# Altium footprint library WR-TBL_Pluggable Connector_3.81mm.PcbLib: 201 footprints (part 11 of 13)
Each footprint in its own frame and in the unit in brackets; x right, y up, seen from the top. Pads: shape width x height; smd on the part's side, far side on the other; paste and mask are expansions set on the pad; w line width, h text height; cw(c..) or ccw(c..) is an arc to the next point about the centre after c.
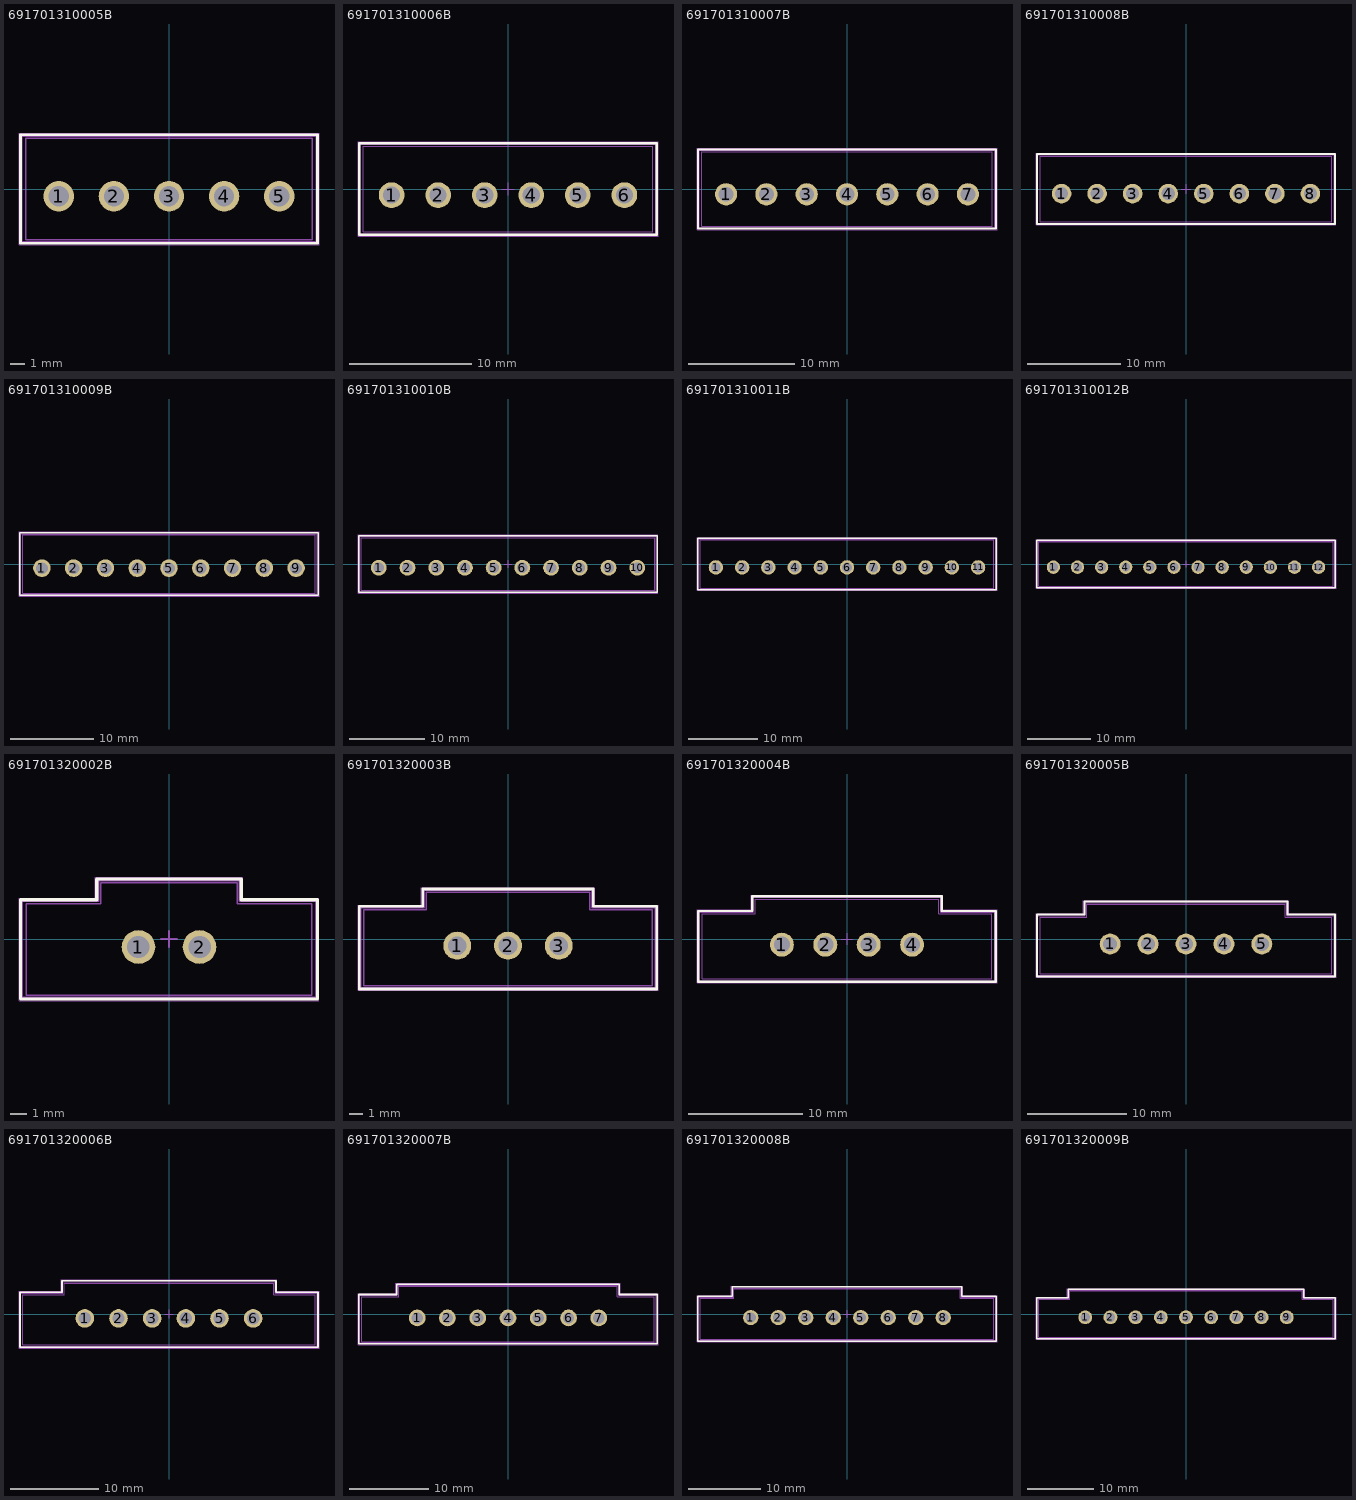
[diagram p10: the footprints below, top view; thin cyan lines are the x and y axes]

## 691701310005B [mm] "Vertical PCB Header THR Type, pitch 3.81mm, 05p"
height 9.2
pads (5):
  round 2.1 hole 1.4: 1(-7.62,-0.5) 2(-3.81,-0.5) 3(0,-0.5) 4(3.81,-0.5) 5(7.62,-0.5)
Top Overlay:
  lines w0.2: -10.27,-3.75 -10.27,3.75 10.27,3.75 10.27,-3.75 -10.27,-3.75
Top Paste:
  region: 2.26,1.75 5.36,1.75 5.36,-2.75 2.26,-2.75
  region: -1.55,1.75 1.55,1.75 1.55,-2.75 -1.55,-2.75
  region: -9.17,1.75 -6.07,1.75 -6.07,-2.75 -9.17,-2.75
  region: -5.36,1.75 -2.26,1.75 -2.26,-2.75 -5.36,-2.75
  region: 6.07,1.75 9.17,1.75 9.17,-2.75 6.07,-2.75
Assembly Notes:
  text "Stencil thickness : 120 μm" at -5.156,-4.701 h1
Top Assembly:
  lines w0.1: -10.17,-3.65 -10.17,3.65 10.17,3.65 10.17,-3.65 -10.17,-3.65
Top Designator:
  text ".Designator" at -3.647,-0.357 h1
Top 3D Body:
  lines w0.1: -9.92,-3.5 -9.92,3.5 9.92,3.5 9.92,-3.5 -9.92,-3.5
Top Courtyard:
  lines w0.05: -10.37,-3.85 -10.37,3.85 10.37,3.85 10.37,-3.85 -10.37,-3.85
Top Component Center:
  lines w0.1: -0.5,0 0.5,0 ; 0,-0.5 0,0.5
3D body "691701310005B.stp": height 9.25, standoff -2.55, extent -10.12,-3.5 10.12,3.5

## 691701310006B [mm] "Vertical PCB Header THR Type, pitch 3.81mm, 06p"
height 9.2
pads (6):
  round 2.1 hole 1.4: 1(-9.525,-0.5) 2(-5.715,-0.5) 3(-1.905,-0.5) 4(1.905,-0.5) 5(5.715,-0.5) 6(9.525,-0.5)
Top Overlay:
  lines w0.2: -12.175,-3.75 -12.175,3.75 12.175,3.75 12.175,-3.75 -12.175,-3.75
Top Paste:
  region: 0.355,1.75 3.455,1.75 3.455,-2.75 0.355,-2.75
  region: -3.455,1.75 -0.355,1.75 -0.355,-2.75 -3.455,-2.75
  region: -11.075,1.75 -7.975,1.75 -7.975,-2.75 -11.075,-2.75
  region: -7.265,1.75 -4.165,1.75 -4.165,-2.75 -7.265,-2.75
  region: 4.165,1.75 7.265,1.75 7.265,-2.75 4.165,-2.75
  region: 7.975,1.75 11.075,1.75 11.075,-2.75 7.975,-2.75
Assembly Notes:
  text "Stencil thickness : 120 μm" at -5.156,-4.701 h1
Top Assembly:
  lines w0.1: -12.075,-3.65 -12.075,3.65 12.075,3.65 12.075,-3.65 -12.075,-3.65
Top Designator:
  text ".Designator" at -3.647,-0.357 h1
Top 3D Body:
  lines w0.1: -11.825,-3.5 -11.825,3.5 11.825,3.5 11.825,-3.5 -11.825,-3.5
Top Courtyard:
  lines w0.05: -12.275,-3.85 -12.275,3.85 12.275,3.85 12.275,-3.85 -12.275,-3.85
Top Component Center:
  lines w0.1: -0.5,0 0.5,0 ; 0,-0.5 0,0.5
3D body "691701310006B.stp": height 9.25, standoff -2.55, extent -12.025,-3.5 12.025,3.5

## 691701310007B [mm] "Vertical PCB Header THR Type, pitch 3.81mm, 07p"
height 9.2
pads (7):
  round 2.1 hole 1.4: 1(-11.43,-0.5) 2(-7.62,-0.5) 3(-3.81,-0.5) 4(0,-0.5) 5(3.81,-0.5) 6(7.62,-0.5) 7(11.43,-0.5)
Top Overlay:
  lines w0.2: -14.08,-3.75 -14.08,3.75 14.08,3.75 14.08,-3.75 -14.08,-3.75
Top Paste:
  region: -1.55,1.75 1.55,1.75 1.55,-2.75 -1.55,-2.75
  region: -5.36,1.75 -2.26,1.75 -2.26,-2.75 -5.36,-2.75
  region: -12.98,1.75 -9.88,1.75 -9.88,-2.75 -12.98,-2.75
  region: -9.17,1.75 -6.07,1.75 -6.07,-2.75 -9.17,-2.75
  region: 2.26,1.75 5.36,1.75 5.36,-2.75 2.26,-2.75
  region: 6.07,1.75 9.17,1.75 9.17,-2.75 6.07,-2.75
  region: 9.88,1.75 12.98,1.75 12.98,-2.75 9.88,-2.75
Assembly Notes:
  text "Stencil thickness : 120 μm" at -5.156,-4.701 h1
Top Assembly:
  lines w0.1: -13.98,-3.65 -13.98,3.65 13.98,3.65 13.98,-3.65 -13.98,-3.65
Top Designator:
  text ".Designator" at -3.647,-0.357 h1
Top 3D Body:
  lines w0.1: -13.73,-3.5 -13.73,3.5 13.73,3.5 13.73,-3.5 -13.73,-3.5
Top Courtyard:
  lines w0.05: -14.18,-3.85 -14.18,3.85 14.18,3.85 14.18,-3.85 -14.18,-3.85
Top Component Center:
  lines w0.1: -0.5,0 0.5,0 ; 0,-0.5 0,0.5
3D body "691701310007B.stp": height 9.25, standoff -2.55, extent -13.93,-3.5 13.93,3.5

## 691701310008B [mm] "Vertical PCB Header THR Type, pitch 3.81mm, 08p"
height 9.2
pads (8):
  round 2.1 hole 1.4: 1(-13.335,-0.5) 2(-9.525,-0.5) 3(-5.715,-0.5) 4(-1.905,-0.5) 5(1.905,-0.5) 6(5.715,-0.5) 7(9.525,-0.5) 8(13.335,-0.5)
Top Overlay:
  lines w0.2: -15.985,-3.75 -15.985,3.75 15.985,3.75 15.985,-3.75 -15.985,-3.75
Top Paste:
  region: -3.455,1.75 -0.355,1.75 -0.355,-2.75 -3.455,-2.75
  region: -7.265,1.75 -4.165,1.75 -4.165,-2.75 -7.265,-2.75
  region: -14.885,1.75 -11.785,1.75 -11.785,-2.75 -14.885,-2.75
  region: -11.075,1.75 -7.975,1.75 -7.975,-2.75 -11.075,-2.75
  region: 0.355,1.75 3.455,1.75 3.455,-2.75 0.355,-2.75
  region: 4.165,1.75 7.265,1.75 7.265,-2.75 4.165,-2.75
  region: 7.975,1.75 11.075,1.75 11.075,-2.75 7.975,-2.75
  region: 11.785,1.75 14.885,1.75 14.885,-2.75 11.785,-2.75
Assembly Notes:
  text "Stencil thickness : 120 μm" at -5.156,-4.701 h1
Top Assembly:
  lines w0.1: -15.885,-3.65 -15.885,3.65 15.885,3.65 15.885,-3.65 -15.885,-3.65
Top Designator:
  text ".Designator" at -3.647,-0.357 h1
Top 3D Body:
  lines w0.1: -15.635,-3.5 -15.635,3.5 15.635,3.5 15.635,-3.5 -15.635,-3.5
Top Courtyard:
  lines w0.05: -16.085,-3.85 -16.085,3.85 16.085,3.85 16.085,-3.85 -16.085,-3.85
Top Component Center:
  lines w0.1: -0.5,0 0.5,0 ; 0,-0.5 0,0.5
3D body "691701310008B.stp": height 9.25, standoff -2.55, extent -15.835,-3.5 15.835,3.5

## 691701310009B [mm] "Vertical PCB Header THR Type, pitch 3.81mm, 09p"
height 9.2
pads (9):
  round 2.1 hole 1.4: 1(-15.24,-0.5) 2(-11.43,-0.5) 3(-7.62,-0.5) 4(-3.81,-0.5) 5(0,-0.5) 6(3.81,-0.5) 7(7.62,-0.5) 8(11.43,-0.5) 9(15.24,-0.5)
Top Overlay:
  lines w0.2: -17.89,-3.75 -17.89,3.75 17.89,3.75 17.89,-3.75 -17.89,-3.75
Top Paste:
  region: -5.36,1.75 -2.26,1.75 -2.26,-2.75 -5.36,-2.75
  region: -9.17,1.75 -6.07,1.75 -6.07,-2.75 -9.17,-2.75
  region: -16.79,1.75 -13.69,1.75 -13.69,-2.75 -16.79,-2.75
  region: -12.98,1.75 -9.88,1.75 -9.88,-2.75 -12.98,-2.75
  region: -1.55,1.75 1.55,1.75 1.55,-2.75 -1.55,-2.75
  region: 2.26,1.75 5.36,1.75 5.36,-2.75 2.26,-2.75
  region: 6.07,1.75 9.17,1.75 9.17,-2.75 6.07,-2.75
  region: 9.88,1.75 12.98,1.75 12.98,-2.75 9.88,-2.75
  region: 13.69,1.75 16.79,1.75 16.79,-2.75 13.69,-2.75
Assembly Notes:
  text "Stencil thickness : 120 μm" at -5.156,-4.701 h1
Top Assembly:
  lines w0.1: -17.79,-3.65 -17.79,3.65 17.79,3.65 17.79,-3.65 -17.79,-3.65
Top Designator:
  text ".Designator" at -3.647,-0.357 h1
Top 3D Body:
  lines w0.1: -17.54,-3.5 -17.54,3.5 17.54,3.5 17.54,-3.5 -17.54,-3.5
Top Courtyard:
  lines w0.05: -17.99,-3.85 -17.99,3.85 17.99,3.85 17.99,-3.85 -17.99,-3.85
Top Component Center:
  lines w0.1: -0.5,0 0.5,0 ; 0,-0.5 0,0.5
3D body "691701310009B.stp": height 9.25, standoff -2.55, extent -17.74,-3.5 17.74,3.5

## 691701310010B [mm] "Vertical PCB Header THR Type, pitch 3.81mm, 10p"
height 9.2
pads (10):
  round 2.1 hole 1.4: 1(-17.145,-0.5) 2(-13.335,-0.5) 3(-9.525,-0.5) 4(-5.715,-0.5) 5(-1.905,-0.5) 6(1.905,-0.5) 7(5.715,-0.5) 8(9.525,-0.5) 9(13.335,-0.5) 10(17.145,-0.5)
Top Overlay:
  lines w0.2: -19.795,-3.75 -19.795,3.75 19.795,3.75 19.795,-3.75 -19.795,-3.75
Top Paste:
  region: -7.265,1.75 -4.165,1.75 -4.165,-2.75 -7.265,-2.75
  region: -11.075,1.75 -7.975,1.75 -7.975,-2.75 -11.075,-2.75
  region: -18.695,1.75 -15.595,1.75 -15.595,-2.75 -18.695,-2.75
  region: -14.885,1.75 -11.785,1.75 -11.785,-2.75 -14.885,-2.75
  region: -3.455,1.75 -0.355,1.75 -0.355,-2.75 -3.455,-2.75
  region: 0.355,1.75 3.455,1.75 3.455,-2.75 0.355,-2.75
  region: 4.165,1.75 7.265,1.75 7.265,-2.75 4.165,-2.75
  region: 7.975,1.75 11.075,1.75 11.075,-2.75 7.975,-2.75
  region: 11.785,1.75 14.885,1.75 14.885,-2.75 11.785,-2.75
  region: 15.595,1.75 18.695,1.75 18.695,-2.75 15.595,-2.75
Assembly Notes:
  text "Stencil thickness : 120 μm" at -5.156,-4.701 h1
Top Assembly:
  lines w0.1: -19.695,-3.65 -19.695,3.65 19.695,3.65 19.695,-3.65 -19.695,-3.65
Top Designator:
  text ".Designator" at -3.647,-0.357 h1
Top 3D Body:
  lines w0.1: -19.445,-3.5 -19.445,3.5 19.445,3.5 19.445,-3.5 -19.445,-3.5
Top Courtyard:
  lines w0.05: -19.895,-3.85 -19.895,3.85 19.895,3.85 19.895,-3.85 -19.895,-3.85
Top Component Center:
  lines w0.1: -0.5,0 0.5,0 ; 0,-0.5 0,0.5
3D body "691701310010B.stp": height 9.25, standoff -2.55, extent -19.645,-3.5 19.645,3.5

## 691701310011B [mm] "Vertical PCB Header THR Type, pitch 3.81mm, 11p"
height 9.2
pads (11):
  round 2.1 hole 1.4: 1(-19.05,-0.5) 2(-15.24,-0.5) 3(-11.43,-0.5) 4(-7.62,-0.5) 5(-3.81,-0.5) 6(0,-0.5) 7(3.81,-0.5) 8(7.62,-0.5) 9(11.43,-0.5) 10(15.24,-0.5) 11(19.05,-0.5)
Top Overlay:
  lines w0.2: -21.7,-3.75 -21.7,3.75 21.7,3.75 21.7,-3.75 -21.7,-3.75
Top Paste:
  region: -9.17,1.75 -6.07,1.75 -6.07,-2.75 -9.17,-2.75
  region: -12.98,1.75 -9.88,1.75 -9.88,-2.75 -12.98,-2.75
  region: -20.6,1.75 -17.5,1.75 -17.5,-2.75 -20.6,-2.75
  region: -16.79,1.75 -13.69,1.75 -13.69,-2.75 -16.79,-2.75
  region: -5.36,1.75 -2.26,1.75 -2.26,-2.75 -5.36,-2.75
  region: -1.55,1.75 1.55,1.75 1.55,-2.75 -1.55,-2.75
  region: 2.26,1.75 5.36,1.75 5.36,-2.75 2.26,-2.75
  region: 6.07,1.75 9.17,1.75 9.17,-2.75 6.07,-2.75
  region: 9.88,1.75 12.98,1.75 12.98,-2.75 9.88,-2.75
  region: 13.69,1.75 16.79,1.75 16.79,-2.75 13.69,-2.75
  region: 17.5,1.75 20.6,1.75 20.6,-2.75 17.5,-2.75
Assembly Notes:
  text "Stencil thickness : 120 μm" at -5.156,-4.701 h1
Top Assembly:
  lines w0.1: -21.6,-3.65 -21.6,3.65 21.6,3.65 21.6,-3.65 -21.6,-3.65
Top Designator:
  text ".Designator" at -3.647,-0.357 h1
Top 3D Body:
  lines w0.1: -21.35,-3.5 -21.35,3.5 21.35,3.5 21.35,-3.5 -21.35,-3.5
Top Courtyard:
  lines w0.05: -21.8,-3.85 -21.8,3.85 21.8,3.85 21.8,-3.85 -21.8,-3.85
Top Component Center:
  lines w0.1: -0.5,0 0.5,0 ; 0,-0.5 0,0.5
3D body "691701310011B.stp": height 9.25, standoff -2.55, extent -21.55,-3.5 21.55,3.5

## 691701310012B [mm] "Vertical PCB Header THR Type, pitch 3.81mm, 12p"
height 9.2
pads (12):
  round 2.1 hole 1.4: 1(-20.955,-0.5) 2(-17.145,-0.5) 3(-13.335,-0.5) 4(-9.525,-0.5) 5(-5.715,-0.5) 6(-1.905,-0.5) 7(1.905,-0.5) 8(5.715,-0.5) 9(9.525,-0.5) 10(13.335,-0.5) 11(17.145,-0.5) 12(20.955,-0.5)
Top Overlay:
  lines w0.2: -23.605,-3.75 23.605,-3.75 23.605,3.75 -23.605,3.75 -23.605,-3.75
Top Paste:
  region: 19.405,1.75 22.505,1.75 22.505,-2.75 19.405,-2.75
  region: 15.595,1.75 18.695,1.75 18.695,-2.75 15.595,-2.75
  region: 11.785,1.75 14.885,1.75 14.885,-2.75 11.785,-2.75
  region: 7.975,1.75 11.075,1.75 11.075,-2.75 7.975,-2.75
  region: 4.165,1.75 7.265,1.75 7.265,-2.75 4.165,-2.75
  region: 0.355,1.75 3.455,1.75 3.455,-2.75 0.355,-2.75
  region: -3.455,1.75 -0.355,1.75 -0.355,-2.75 -3.455,-2.75
  region: -7.265,1.75 -4.165,1.75 -4.165,-2.75 -7.265,-2.75
  region: -18.695,1.75 -15.595,1.75 -15.595,-2.75 -18.695,-2.75
  region: -22.505,1.75 -19.405,1.75 -19.405,-2.75 -22.505,-2.75
  region: -14.885,1.75 -11.785,1.75 -11.785,-2.75 -14.885,-2.75
  region: -11.075,1.75 -7.975,1.75 -7.975,-2.75 -11.075,-2.75
Assembly Notes:
  text "Stencil thickness : 120 μm" at -5.156,-4.701 h1
Top Assembly:
  lines w0.1: -23.505,-3.65 23.505,-3.65 23.505,3.65 -23.505,3.65 -23.505,-3.65
Top Designator:
  text ".Designator" at -3.647,-0.357 h1
Top 3D Body:
  lines w0.1: -23.255,-3.5 23.255,-3.5 23.255,3.5 -23.255,3.5 -23.255,-3.5
Top Courtyard:
  lines w0.05: -23.705,-3.85 23.705,-3.85 23.705,3.85 -23.705,3.85 -23.705,-3.85
Top Component Center:
  lines w0.1: -0.5,0 0.5,0 ; 0,-0.5 0,0.5
3D body "691701310012B.stp": height 9.25, standoff -2.55, extent -23.455,-3.5 23.455,3.5

## 691701320002B [mm] "THR - 3,81mm - PCB Vertical Flange - 02p"
height 9.2
pads (2):
  round 2.1 hole 1.4: 1(-1.905,-0.5) 2(1.905,-0.5)
Top Overlay:
  lines w0.2: -9.255,-3.75 -9.255,2.45 -4.5,2.45 -4.5,3.75 4.5,3.75 4.5,2.45 9.255,2.45 9.255,-3.75 -9.255,-3.75
Top Paste:
  region: -3.455,1.75 -0.355,1.75 -0.355,-2.75 -3.455,-2.75
  region: 0.355,1.75 3.455,1.75 3.455,-2.75 0.355,-2.75
Assembly Notes:
  text "Stencil thickness : 120 μm" at -5.156,-4.601 h1
Top Assembly:
  lines w0.1: -9.155,-3.65 -9.155,2.35 -4.4,2.35 -4.4,3.65 4.4,3.65 4.4,2.35 9.155,2.35 9.155,-3.65 -9.155,-3.65
Top Designator:
  text ".Designator" at -3.647,-0.357 h1
Top 3D Body:
  lines w0.1: -8.905,-3.5 -8.905,2.2 -4.25,2.2 -4.25,3.5 4.25,3.5 4.25,2.2 8.905,2.2 8.905,-3.5 -8.905,-3.5
Top Courtyard:
  lines w0.05: -9.355,-3.85 9.355,-3.85 9.355,2.55 4.6,2.55 4.6,3.85 -4.6,3.85 -4.6,2.55 -9.355,2.55 -9.355,-3.85
Top Component Center:
  lines w0.1: -0.5,0 0.5,0 ; 0,-0.5 0,0.5
3D body "691701320002B.stp": height 9.26, standoff -2.55, extent -8.905,-3.5 8.905,3.5

## 691701320003B [mm] "THR - 3,81mm - PCB Vertical Flange - 03p"
height 9.2
pads (3):
  round 2.1 hole 1.4: 1(-3.81,-0.5) 2(0,-0.5) 3(3.81,-0.5)
Top Overlay:
  lines w0.2: -11.16,-3.75 -11.16,2.45 -6.405,2.45 -6.405,3.75 6.405,3.75 6.405,2.45 11.16,2.45 11.16,-3.75 -11.16,-3.75
Top Paste:
  region: -5.36,1.75 -2.26,1.75 -2.26,-2.75 -5.36,-2.75
  region: -1.55,1.75 1.55,1.75 1.55,-2.75 -1.55,-2.75
  region: 2.26,1.75 5.36,1.75 5.36,-2.75 2.26,-2.75
Assembly Notes:
  text "Stencil thickness : 120 μm" at -5.156,-4.601 h1
Top Assembly:
  lines w0.1: -11.06,-3.65 -11.06,2.35 -6.305,2.35 -6.305,3.65 6.305,3.65 6.305,2.35 11.06,2.35 11.06,-3.65 -11.06,-3.65
Top Designator:
  text ".Designator" at -3.647,-0.357 h1
Top 3D Body:
  lines w0.1: -10.81,-3.5 -10.81,2.2 -6.155,2.2 -6.155,3.5 6.155,3.5 6.155,2.2 10.81,2.2 10.81,-3.5 -10.81,-3.5
Top Courtyard:
  lines w0.05: -11.26,-3.85 11.26,-3.85 11.26,2.55 6.505,2.55 6.505,3.85 -6.505,3.85 -6.505,2.55 -11.26,2.55 -11.26,-3.85
Top Component Center:
  lines w0.1: -0.5,0 0.5,0 ; 0,-0.5 0,0.5
3D body "691701320003B.stp": height 9.26, standoff -2.55, extent -10.81,-3.5 10.81,3.5

## 691701320004B [mm] "THR - 3,81mm - PCB Vertical Flange - 04p"
height 9.2
pads (4):
  round 2.1 hole 1.4: 1(-5.715,-0.5) 2(-1.905,-0.5) 3(1.905,-0.5) 4(5.715,-0.5)
Top Overlay:
  lines w0.2: -13.065,-3.75 13.065,-3.75 13.065,2.45 8.31,2.45 8.31,3.75 -8.31,3.75 -8.31,2.45 -13.065,2.45 -13.065,-3.75
Top Paste:
  region: 4.165,1.75 7.265,1.75 7.265,-2.75 4.165,-2.75
  region: 0.355,1.75 3.455,1.75 3.455,-2.75 0.355,-2.75
  region: -3.455,1.75 -0.355,1.75 -0.355,-2.75 -3.455,-2.75
  region: -7.265,1.75 -4.165,1.75 -4.165,-2.75 -7.265,-2.75
Assembly Notes:
  text "Stencil thickness : 120 μm" at -5.156,-4.601 h1
Top Assembly:
  lines w0.1: -12.965,-3.65 12.965,-3.65 12.965,2.35 8.21,2.35 8.21,3.65 -8.21,3.65 -8.21,2.35 -12.965,2.35 -12.965,-3.65
Top Designator:
  text ".Designator" at -3.647,-0.357 h1
Top 3D Body:
  lines w0.1: -12.715,-3.5 12.715,-3.5 12.715,2.2 8.06,2.2 8.06,3.5 -8.06,3.5 -8.06,2.2 -12.715,2.2 -12.715,-3.5
Top Courtyard:
  lines w0.05: -13.165,-3.85 -13.165,2.55 -8.41,2.55 -8.41,3.85 8.41,3.85 8.41,2.55 13.165,2.55 13.165,-3.85 -13.165,-3.85
Top Component Center:
  lines w0.1: -0.5,0 0.5,0 ; 0,-0.5 0,0.5
3D body "691701320004B.stp": height 9.26, standoff -2.55, extent -12.715,-3.5 12.715,3.5

## 691701320005B [mm] "THR - 3,81mm - PCB Vertical Flange - 05p"
height 9.2
pads (5):
  round 2.1 hole 1.4: 1(-7.62,-0.5) 2(-3.81,-0.5) 3(0,-0.5) 4(3.81,-0.5) 5(7.62,-0.5)
Top Overlay:
  lines w0.2: -14.97,-3.75 14.97,-3.75 14.97,2.45 10.215,2.45 10.215,3.75 -10.215,3.75 -10.215,2.45 -14.97,2.45 -14.97,-3.75
Top Paste:
  region: 2.26,1.75 5.36,1.75 5.36,-2.75 2.26,-2.75
  region: -1.55,1.75 1.55,1.75 1.55,-2.75 -1.55,-2.75
  region: -5.36,1.75 -2.26,1.75 -2.26,-2.75 -5.36,-2.75
  region: -9.17,1.75 -6.07,1.75 -6.07,-2.75 -9.17,-2.75
  region: 6.07,1.75 9.17,1.75 9.17,-2.75 6.07,-2.75
Assembly Notes:
  text "Stencil thickness : 120 μm" at -5.156,-4.601 h1
Top Assembly:
  lines w0.1: -14.87,-3.65 14.87,-3.65 14.87,2.35 10.115,2.35 10.115,3.65 -10.115,3.65 -10.115,2.35 -14.87,2.35 -14.87,-3.65
Top Designator:
  text ".Designator" at -3.647,-0.357 h1
Top 3D Body:
  lines w0.1: -14.62,-3.5 14.62,-3.5 14.62,2.2 9.965,2.2 9.965,3.5 -9.965,3.5 -9.965,2.2 -14.62,2.2 -14.62,-3.5
Top Courtyard:
  lines w0.05: -15.07,-3.85 -15.07,2.55 -10.315,2.55 -10.315,3.85 10.315,3.85 10.315,2.55 15.07,2.55 15.07,-3.85 -15.07,-3.85
Top Component Center:
  lines w0.1: -0.5,0 0.5,0 ; 0,-0.5 0,0.5
3D body "691701320005B.stp": height 9.26, standoff -2.55, extent -14.62,-3.5 14.62,3.5

## 691701320006B [mm] "THR - 3,81mm - PCB Vertical Flange - 06p"
height 9.2
pads (6):
  round 2.1 hole 1.4: 1(-9.525,-0.5) 2(-5.715,-0.5) 3(-1.905,-0.5) 4(1.905,-0.5) 5(5.715,-0.5) 6(9.525,-0.5)
Top Overlay:
  lines w0.2: -16.875,-3.75 16.875,-3.75 16.875,2.45 12.12,2.45 12.12,3.75 -12.12,3.75 -12.12,2.45 -16.875,2.45 -16.875,-3.75
Top Paste:
  region: 0.355,1.75 3.455,1.75 3.455,-2.75 0.355,-2.75
  region: -3.455,1.75 -0.355,1.75 -0.355,-2.75 -3.455,-2.75
  region: -7.265,1.75 -4.165,1.75 -4.165,-2.75 -7.265,-2.75
  region: -11.075,1.75 -7.975,1.75 -7.975,-2.75 -11.075,-2.75
  region: 4.165,1.75 7.265,1.75 7.265,-2.75 4.165,-2.75
  region: 7.975,1.75 11.075,1.75 11.075,-2.75 7.975,-2.75
Assembly Notes:
  text "Stencil thickness : 120 μm" at -5.156,-4.601 h1
Top Assembly:
  lines w0.1: -16.775,-3.65 16.775,-3.65 16.775,2.35 12.02,2.35 12.02,3.65 -12.02,3.65 -12.02,2.35 -16.775,2.35 -16.775,-3.65
Top Designator:
  text ".Designator" at -3.647,-0.357 h1
Top 3D Body:
  lines w0.1: -16.525,-3.5 16.525,-3.5 16.525,2.2 11.87,2.2 11.87,3.5 -11.87,3.5 -11.87,2.2 -16.525,2.2 -16.525,-3.5
Top Courtyard:
  lines w0.05: -16.975,-3.85 -16.975,2.55 -12.22,2.55 -12.22,3.85 12.22,3.85 12.22,2.55 16.975,2.55 16.975,-3.85 -16.975,-3.85
Top Component Center:
  lines w0.1: -0.5,0 0.5,0 ; 0,-0.5 0,0.5
3D body "691701320006B.stp": height 9.26, standoff -2.55, extent -16.525,-3.5 16.525,3.5

## 691701320007B [mm] "THR - 3,81mm - PCB Vertical Flange - 07p"
height 9.2
pads (7):
  round 2.1 hole 1.4: 1(-11.43,-0.5) 2(-7.62,-0.5) 3(-3.81,-0.5) 4(0,-0.5) 5(3.81,-0.5) 6(7.62,-0.5) 7(11.43,-0.5)
Top Overlay:
  lines w0.2: -18.78,-3.75 18.78,-3.75 18.78,2.45 14.025,2.45 14.025,3.75 -14.025,3.75 -14.025,2.45 -18.78,2.45 -18.78,-3.75
Top Paste:
  region: -1.55,1.75 1.55,1.75 1.55,-2.75 -1.55,-2.75
  region: -5.36,1.75 -2.26,1.75 -2.26,-2.75 -5.36,-2.75
  region: -9.17,1.75 -6.07,1.75 -6.07,-2.75 -9.17,-2.75
  region: -12.98,1.75 -9.88,1.75 -9.88,-2.75 -12.98,-2.75
  region: 2.26,1.75 5.36,1.75 5.36,-2.75 2.26,-2.75
  region: 6.07,1.75 9.17,1.75 9.17,-2.75 6.07,-2.75
  region: 9.88,1.75 12.98,1.75 12.98,-2.75 9.88,-2.75
Assembly Notes:
  text "Stencil thickness : 120 μm" at -5.156,-4.601 h1
Top Assembly:
  lines w0.1: -18.68,-3.65 18.68,-3.65 18.68,2.35 13.925,2.35 13.925,3.65 -13.925,3.65 -13.925,2.35 -18.68,2.35 -18.68,-3.65
Top Designator:
  text ".Designator" at -3.647,-0.357 h1
Top 3D Body:
  lines w0.1: -18.43,-3.5 18.43,-3.5 18.43,2.2 13.775,2.2 13.775,3.5 -13.775,3.5 -13.775,2.2 -18.43,2.2 -18.43,-3.5
Top Courtyard:
  lines w0.05: -18.88,-3.85 -18.88,2.55 -14.125,2.55 -14.125,3.85 14.125,3.85 14.125,2.55 18.88,2.55 18.88,-3.85 -18.88,-3.85
Top Component Center:
  lines w0.1: -0.5,0 0.5,0 ; 0,-0.5 0,0.5
3D body "691701320007B.stp": height 9.26, standoff -2.55, extent -18.43,-3.5 18.43,3.5

## 691701320008B [mm] "THR - 3,81mm - PCB Vertical Flange - 08p"
height 9.2
pads (8):
  round 2.1 hole 1.4: 1(-13.335,-0.5) 2(-9.525,-0.5) 3(-5.715,-0.5) 4(-1.905,-0.5) 5(1.905,-0.5) 6(5.715,-0.5) 7(9.525,-0.5) 8(13.335,-0.5)
Top Overlay:
  lines w0.2: -20.685,-3.75 20.685,-3.75 20.685,2.45 15.93,2.45 15.93,3.75 -15.93,3.75 -15.93,2.45 -20.685,2.45 -20.685,-3.75
Top Paste:
  region: -3.455,1.75 -0.355,1.75 -0.355,-2.75 -3.455,-2.75
  region: -7.265,1.75 -4.165,1.75 -4.165,-2.75 -7.265,-2.75
  region: -11.075,1.75 -7.975,1.75 -7.975,-2.75 -11.075,-2.75
  region: -14.885,1.75 -11.785,1.75 -11.785,-2.75 -14.885,-2.75
  region: 0.355,1.75 3.455,1.75 3.455,-2.75 0.355,-2.75
  region: 4.165,1.75 7.265,1.75 7.265,-2.75 4.165,-2.75
  region: 7.975,1.75 11.075,1.75 11.075,-2.75 7.975,-2.75
  region: 11.785,1.75 14.885,1.75 14.885,-2.75 11.785,-2.75
Assembly Notes:
  text "Stencil thickness : 120 μm" at -5.156,-4.601 h1
Top Assembly:
  lines w0.1: -20.585,-3.65 20.585,-3.65 20.585,2.35 15.83,2.35 15.83,3.65 -15.83,3.65 -15.83,2.35 -20.585,2.35 -20.585,-3.65
Top Designator:
  text ".Designator" at -3.647,-0.357 h1
Top 3D Body:
  lines w0.1: -20.335,-3.5 20.335,-3.5 20.335,2.2 15.68,2.2 15.68,3.5 -15.68,3.5 -15.68,2.2 -20.335,2.2 -20.335,-3.5
Top Courtyard:
  lines w0.05: -20.785,-3.85 -20.785,2.55 -16.03,2.55 -16.03,3.85 16.03,3.85 16.03,2.55 20.785,2.55 20.785,-3.85 -20.785,-3.85
Top Component Center:
  lines w0.1: -0.5,0 0.5,0 ; 0,-0.5 0,0.5
3D body "691701320008B.stp": height 9.26, standoff -2.55, extent -20.335,-3.5 20.335,3.5

## 691701320009B [mm] "THR - 3,81mm - PCB Vertical Flange - 09p"
height 9.2
pads (9):
  round 2.1 hole 1.4: 1(-15.24,-0.5) 2(-11.43,-0.5) 3(-7.62,-0.5) 4(-3.81,-0.5) 5(0,-0.5) 6(3.81,-0.5) 7(7.62,-0.5) 8(11.43,-0.5) 9(15.24,-0.5)
Top Overlay:
  lines w0.2: -22.59,-3.75 -22.59,2.45 -17.835,2.45 -17.835,3.75 17.835,3.75 17.835,2.45 22.59,2.45 22.59,-3.75 -22.59,-3.75
Top Paste:
  region: 13.69,1.75 16.79,1.75 16.79,-2.75 13.69,-2.75
  region: 9.88,1.75 12.98,1.75 12.98,-2.75 9.88,-2.75
  region: 6.07,1.75 9.17,1.75 9.17,-2.75 6.07,-2.75
  region: 2.26,1.75 5.36,1.75 5.36,-2.75 2.26,-2.75
  region: -1.55,1.75 1.55,1.75 1.55,-2.75 -1.55,-2.75
  region: -16.79,1.75 -13.69,1.75 -13.69,-2.75 -16.79,-2.75
  region: -12.98,1.75 -9.88,1.75 -9.88,-2.75 -12.98,-2.75
  region: -9.17,1.75 -6.07,1.75 -6.07,-2.75 -9.17,-2.75
  region: -5.36,1.75 -2.26,1.75 -2.26,-2.75 -5.36,-2.75
Assembly Notes:
  text "Stencil thickness : 120 μm" at -5.156,-4.601 h1
Top Assembly:
  lines w0.1: -22.49,-3.65 -22.49,2.35 -17.735,2.35 -17.735,3.65 17.735,3.65 17.735,2.35 22.49,2.35 22.49,-3.65 -22.49,-3.65
Top Designator:
  text ".Designator" at -3.647,-0.357 h1
Top 3D Body:
  lines w0.1: -22.24,-3.5 -22.24,2.2 -17.585,2.2 -17.585,3.5 17.585,3.5 17.585,2.2 22.24,2.2 22.24,-3.5 -22.24,-3.5
Top Courtyard:
  lines w0.05: -22.69,-3.85 22.69,-3.85 22.69,2.55 17.935,2.55 17.935,3.85 -17.935,3.85 -17.935,2.55 -22.69,2.55 -22.69,-3.85
Top Component Center:
  lines w0.1: -0.5,0 0.5,0 ; 0,-0.5 0,0.5
3D body "691701320009B.stp": height 9.26, standoff -2.55, extent -22.24,-3.5 22.24,3.5